# Altium footprint library Orion-Bridge.PcbLib: 19 footprints (part 2 of 2)
Each footprint in its own frame and in the unit in brackets; x right, y up, seen from the top. Pads: shape width x height; smd on the part's side, far side on the other; paste and mask are expansions set on the pad; w line width, h text height; cw(c..) or ccw(c..) is an arc to the next point about the centre after c.
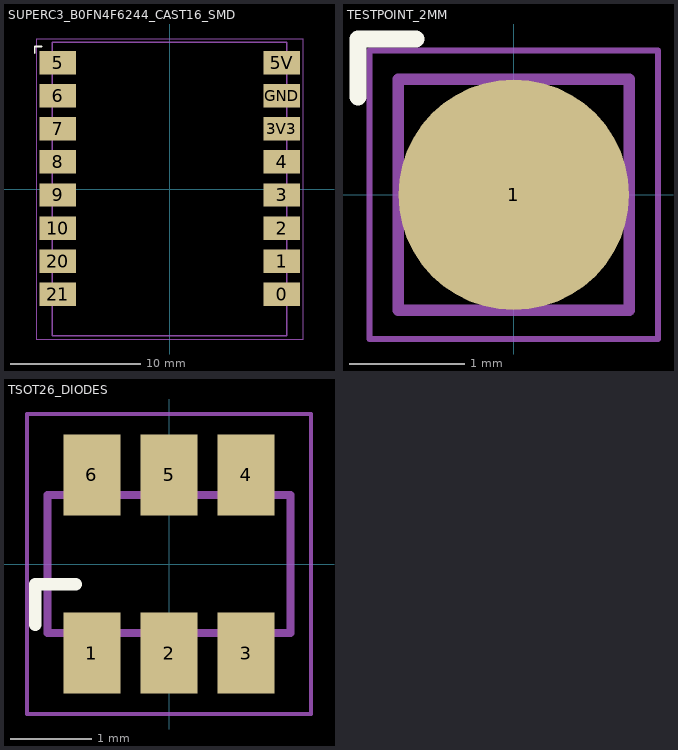
[diagram p1: the footprints below, top view; thin cyan lines are the x and y axes]

## SUPERC3_B0FN4F6244_CAST16_SMD [mm] "Selected ASIN B0FN4F6244. 16 SMD lands only, 2.8x1.8 at X +/-8.6; 2.54 pitch from Nologo reference. Outer castellation dimensions inferred from selected product photo, not a manufacturer land drawing. Manual perimeter soldering; no stencil paste, no carrier PTH, no pin headers. USB tails require the separate carrier cutout; see mechanical_interfaces."
height 4.4
pads (16):
  rect 2.8x1.8 smd paste-10: 0(8.6,-8.079) 1(8.6,-5.539) 2(8.6,-2.999) 3(8.6,-0.459) 3V3(8.6,4.621) 4(8.6,2.081) 5(-8.6,9.701) 5V(8.6,9.701) 6(-8.6,7.161) 7(-8.6,4.621) 8(-8.6,2.081) 9(-8.6,-0.459) 10(-8.6,-2.999) 20(-8.6,-5.539) 21(-8.6,-8.079) GND(8.6,7.161)
Top Overlay:
  lines w0.15: -10.35,10.451 -10.35,10.951 -9.85,10.951
Component bodies:
  lines w0.1: -9,-11.26 9,-11.26 9,11.26 -9,11.26 -9,-11.26
Courtyards:
  lines w0.05: -10.25,-11.51 10.25,-11.51 10.25,11.51 -10.25,11.51 -10.25,-11.51
3D body: height 1.1, standoff 0.1, extent -9,-11.26 9,11.26
3D body: height 2.05, standoff 1.1, extent -2.886,-6.986 4.186,0.086
3D body: height 2.35, standoff 1.1, extent -3.5,-11.1 3.5,-8.8
3D body: height 2.4, standoff 2.35, extent -3.025,-11.09 3.025,-8.81
3D body: height 1.9, standoff 1.1, extent -6.1,-8.5 -2.9,-6
3D body: height 2.2, standoff 1.1, extent -6.9,-1.3 -4,0.3
3D body: height 1.32, standoff 1.1, extent -4.6,4.65 4.6,12.65
3D body: height 4.4, standoff 4.18, extent -4.6,4.65 4.6,12.65
3D body: height 4.18, standoff 1.32, extent -4.6,4.65 -4.4,12.65
3D body: height 4.18, standoff 1.32, extent 4.4,4.65 4.6,12.65
3D body: height 4.18, standoff 1.32, extent -4.4,4.65 4.4,5.45
3D body: height 2.91, standoff 2.59, extent -3.35,6.55 3.35,12.35
3D body: height 2.93, standoff 2.91, extent -2.86,8.15 -2.64,11.95
3D body: height 2.93, standoff 2.91, extent -2.36,8.15 -2.14,11.95
3D body: height 2.93, standoff 2.91, extent -1.86,8.15 -1.64,11.95
3D body: height 2.93, standoff 2.91, extent -1.36,8.15 -1.14,11.95
3D body: height 2.93, standoff 2.91, extent -0.86,8.15 -0.64,11.95
3D body: height 2.93, standoff 2.91, extent -0.36,8.15 -0.14,11.95
3D body: height 2.93, standoff 2.91, extent 0.14,8.15 0.36,11.95
3D body: height 2.93, standoff 2.91, extent 0.64,8.15 0.86,11.95
3D body: height 2.93, standoff 2.91, extent 1.14,8.15 1.36,11.95
3D body: height 2.93, standoff 2.91, extent 1.64,8.15 1.86,11.95
3D body: height 2.93, standoff 2.91, extent 2.14,8.15 2.36,11.95
3D body: height 2.93, standoff 2.91, extent 2.64,8.15 2.86,11.95
3D body: height 1.4, standoff -0.65, extent -4.675,5.3 -4.225,6.3
3D body: height 1.4, standoff -0.65, extent -4.675,9.65 -4.225,10.65
3D body: height 1.4, standoff -0.65, extent 4.225,5.3 4.675,6.3
3D body: height 1.4, standoff -0.65, extent 4.225,9.65 4.675,10.65
3D body: height 1.65, standoff 1.1, extent -4.9,0.55 -0.6,4.05
3D body: height 2.15, standoff 1.65, extent -4.8,0.65 -0.7,3.95
3D body: height 2.75, standoff 2.15, extent -3.6,1.45 -1.9,3.15
3D body: height 1.65, standoff 1.1, extent 0.6,0.55 4.9,4.05
3D body: height 2.15, standoff 1.65, extent 0.7,0.65 4.8,3.95
3D body: height 2.75, standoff 2.15, extent 1.9,1.45 3.6,3.15
3D body: height 1.12, standoff 0.08, extent -9,8.926 -8.76,10.476
3D body: height 1.12, standoff 1.1, extent -9,8.926 -7.3,10.476
3D body: height 1.12, standoff 0.08, extent -9,6.386 -8.76,7.936
3D body: height 1.12, standoff 1.1, extent -9,6.386 -7.3,7.936
3D body: height 1.12, standoff 0.08, extent -9,3.846 -8.76,5.396
3D body: height 1.12, standoff 1.1, extent -9,3.846 -7.3,5.396
3D body: height 1.12, standoff 0.08, extent -9,1.306 -8.76,2.856
3D body: height 1.12, standoff 1.1, extent -9,1.306 -7.3,2.856
3D body: height 1.12, standoff 0.08, extent -9,-1.234 -8.76,0.316
3D body: height 1.12, standoff 1.1, extent -9,-1.234 -7.3,0.316
3D body: height 1.12, standoff 0.08, extent -9,-3.774 -8.76,-2.224
3D body: height 1.12, standoff 1.1, extent -9,-3.774 -7.3,-2.224
3D body: height 1.12, standoff 0.08, extent -9,-6.314 -8.76,-4.764
3D body: height 1.12, standoff 1.1, extent -9,-6.314 -7.3,-4.764
3D body: height 1.12, standoff 0.08, extent -9,-8.854 -8.76,-7.304
3D body: height 1.12, standoff 1.1, extent -9,-8.854 -7.3,-7.304
3D body: height 1.12, standoff 0.08, extent 8.76,8.926 9,10.476
3D body: height 1.12, standoff 1.1, extent 7.3,8.926 9,10.476
3D body: height 1.12, standoff 0.08, extent 8.76,6.386 9,7.936
3D body: height 1.12, standoff 1.1, extent 7.3,6.386 9,7.936
3D body: height 1.12, standoff 0.08, extent 8.76,3.846 9,5.396
3D body: height 1.12, standoff 1.1, extent 7.3,3.846 9,5.396
3D body: height 1.12, standoff 0.08, extent 8.76,1.306 9,2.856
3D body: height 1.12, standoff 1.1, extent 7.3,1.306 9,2.856
3D body: height 1.12, standoff 0.08, extent 8.76,-1.234 9,0.316
3D body: height 1.12, standoff 1.1, extent 7.3,-1.234 9,0.316
3D body: height 1.12, standoff 0.08, extent 8.76,-3.774 9,-2.224
3D body: height 1.12, standoff 1.1, extent 7.3,-3.774 9,-2.224
3D body: height 1.12, standoff 0.08, extent 8.76,-6.314 9,-4.764
3D body: height 1.12, standoff 1.1, extent 7.3,-6.314 9,-4.764
3D body: height 1.12, standoff 0.08, extent 8.76,-8.854 9,-7.304
3D body: height 1.12, standoff 1.1, extent 7.3,-8.854 9,-7.304

## TESTPOINT_2MM [mm] "2 mm exposed top-copper test pad; no paste"
pads (1):
  round 2 smd: 1(0,0)
Top Overlay:
  lines w0.15: -1.35,0.85 -1.35,1.35 -0.85,1.35
Component bodies:
  lines w0.1: -1,-1 1,-1 1,1 -1,1 -1,-1
Courtyards:
  lines w0.05: -1.25,-1.25 1.25,-1.25 1.25,1.25 -1.25,1.25 -1.25,-1.25
3D body: height 0.06, standoff 0.03, extent -1,-1 1,1

## TSOT26_DIODES [mm] "Diodes DS41326 Rev3-2 p17 suggested TSOT26 copper: X=.70,Y=1.00,Y1=3.20 total span,C=.95. Top view: pin1 lower-left; pin4 upper-right."
height 1
pads (6):
  rect 0.7x1 smd: 1(-0.95,-1.1) 2(0,-1.1) 3(0.95,-1.1) 4(0.95,1.1) 5(0,1.1) 6(-0.95,1.1)
Top Overlay:
  lines w0.15: -1.65,-0.75 -1.65,-0.25 -1.15,-0.25
Component bodies:
  lines w0.1: -1.5,-0.85 1.5,-0.85 1.5,0.85 -1.5,0.85 -1.5,-0.85
Courtyards:
  lines w0.05: -1.75,-1.85 1.75,-1.85 1.75,1.85 -1.75,1.85 -1.75,-1.85
3D body: height 1, standoff 0.08, extent -1.5,-0.85 1.5,0.85
3D body: height 0.22, standoff 0.03, extent -1.175,-1.35 -0.725,-0.55
3D body: height 0.22, standoff 0.03, extent -0.225,-1.35 0.225,-0.55
3D body: height 0.22, standoff 0.03, extent 0.725,-1.35 1.175,-0.55
3D body: height 0.22, standoff 0.03, extent 0.725,0.55 1.175,1.35
3D body: height 0.22, standoff 0.03, extent -0.225,0.55 0.225,1.35
3D body: height 0.22, standoff 0.03, extent -1.175,0.55 -0.725,1.35
3D body: height 1.01, standoff 1, extent -1.03,-0.64 -0.77,-0.38